# Altium schematic symbol library ECS-.327-12.5-16-TR.SchLib: 1 symbol
Pins are listed as number, name and electrical type; pins without a type are passive.

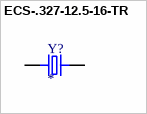
[diagram p0: symbol ECS-.327-12.5-16-TR]

## ECS-.327-12.5-16-TR
designator Y?
SMD Tuning Fork Crystal; MF: {'manufacturer': u'ECS Inc.'}; MP: ECS-.327-12.5-16-TR; Package: None; Price: None; Value: *; Availability: Unavailable
footprint XTAL_ECS-.327-12.5-16-TR
pins: 1, 2